# Altium schematic symbol library MCP1640CT-I_CHY.SchLib: 1 symbol
Pins are listed as number, name and electrical type; pins without a type are passive.

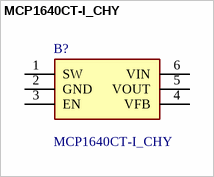
[diagram p0: symbol MCP1640CT-I_CHY]

## MCP1640CT-I_CHY
designator B?
Synchronous Boost Regulator; Manufacturer_Name: Microchip; Manufacturer_Part_Number: MCP1640CT-I/CHY; Geometry.Height: 1.45mm; Mouser Part Number: 579-MCP1640CT-I/CHY; Mouser Price/Stock: https://www.mouser.co.uk/ProductDetail/Microchip-Technology/MCP1640CT-I-CHY?qs=Z2DEGP6RHSmRdGno4hwnww%3D%3D; Arrow Part Number: MCP1640CT-I/CHY; Arrow Price/Stock: https://www.arrow.com/en/products/mcp1640ct-ichy/microchip-technology?region=nac; Datasheet Link: http://ww1.microchip.com/downloads/en/DeviceDoc/20002234D.pdf
footprint SOT95P270X145-6N
pins: 1 SW, 2 GND, 3 EN, 4 VFB, 5 VOUT, 6 VIN